# Altium footprint library John_W.PcbLib: 35 footprints (part 2 of 3)
Each footprint in its own frame and in the unit in brackets; x right, y up, seen from the top. Pads: shape width x height; smd on the part's side, far side on the other; paste and mask are expansions set on the pad; w line width, h text height; cw(c..) or ccw(c..) is an arc to the next point about the centre after c.
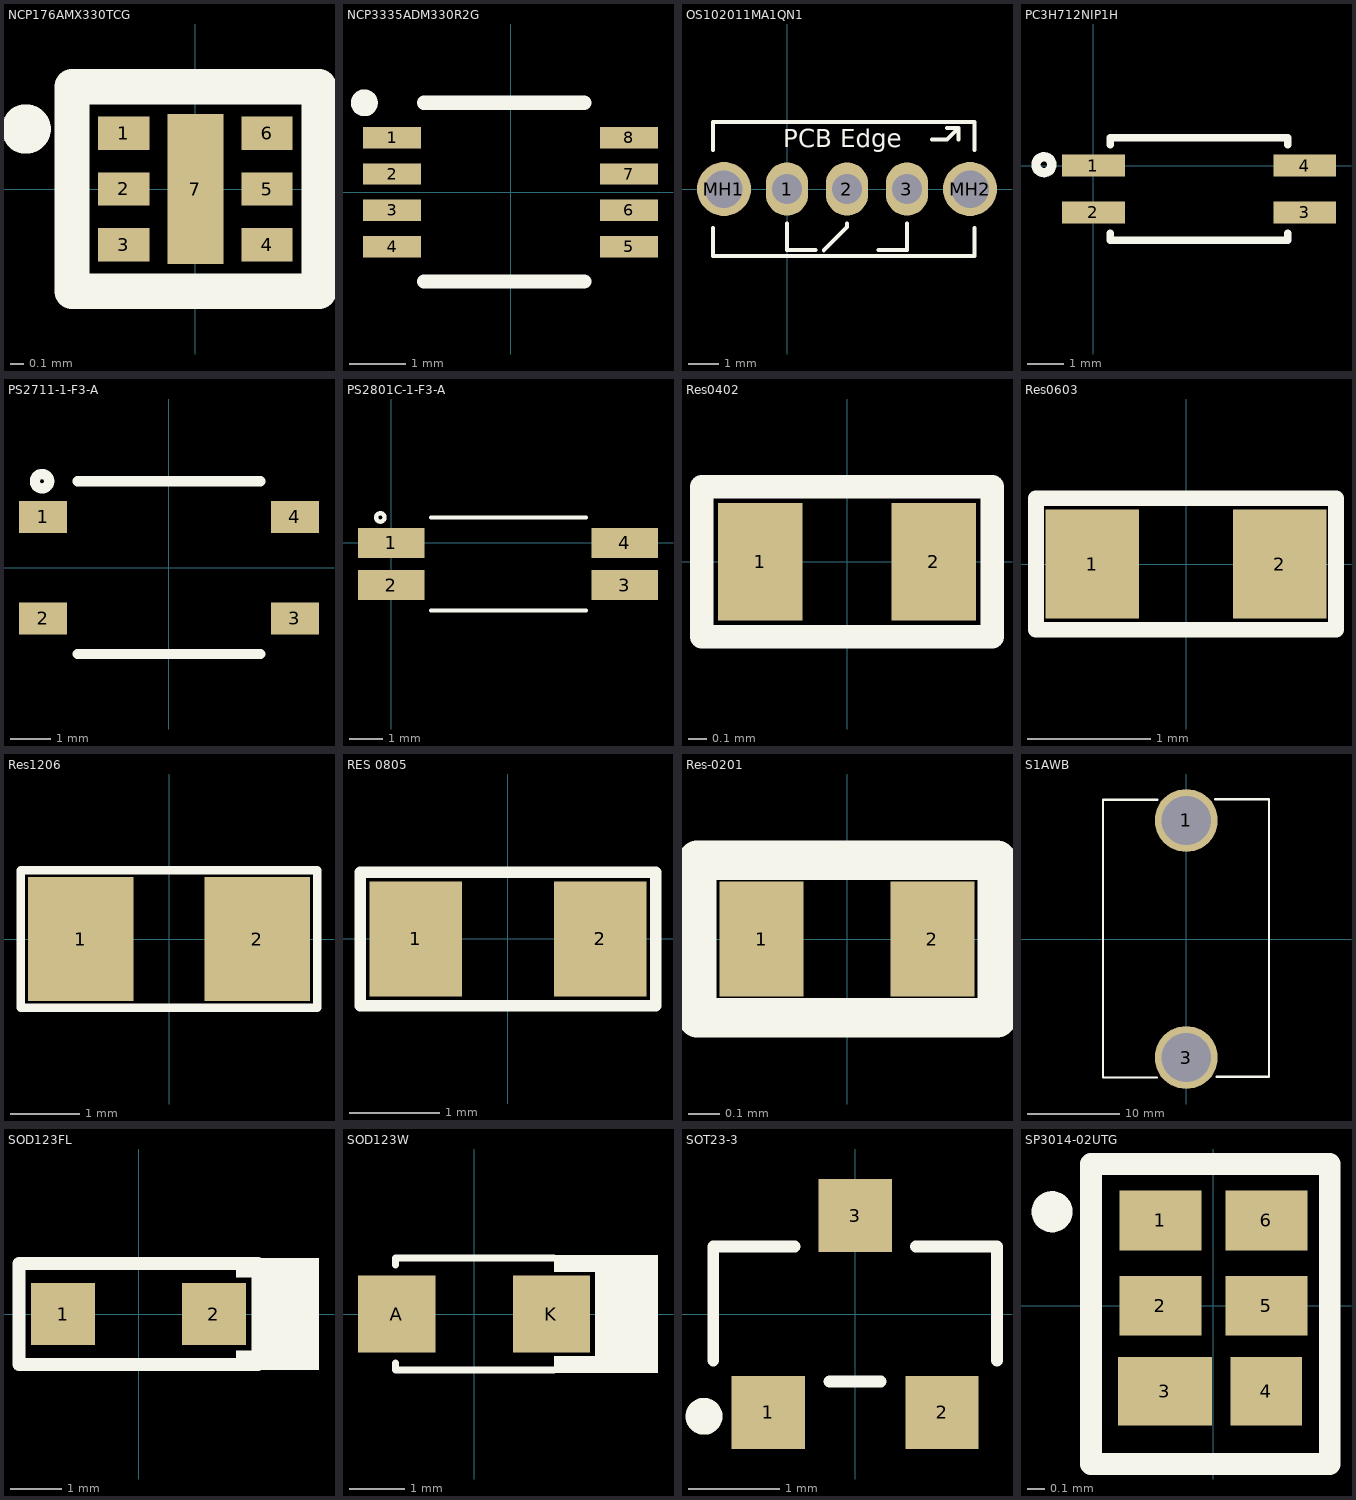
[diagram p1: the footprints below, top view; thin cyan lines are the x and y axes]

## NCP176AMX330TCG [mm]
pads (7):
  rect 0.37x0.24 smd: 1(-0.515,0.4) 2(-0.515,0) 3(-0.515,-0.4) 4(0.515,-0.4) 5(0.515,0) 6(0.515,0.4)
  rect 0.4x1.08 smd: 7(0,0)
Top Overlay:
  circle w0.254: c-1.219,0.432 r0.051
  lines w0.254: -0.889,-0.737 0.889,-0.737 0.889,0.737 -0.889,0.737 -0.889,-0.737

## NCP3335ADM330R2G [mm]
pads (8):
  rect 1.04x0.38 smd: 1(-2.12,0.975) 2(-2.12,0.325) 3(-2.12,-0.325) 4(-2.12,-0.975) 5(2.12,-0.975) 6(2.12,-0.325) 7(2.12,0.325) 8(2.12,0.975)
Top Overlay:
  circle w0.254: c-2.616,1.6 r0.114
  lines w0.254: -1.549,-1.6 1.321,-1.6 ; -1.549,1.6 1.321,1.6
3D body "User Library-MSOP-8 MSOP-8L.step": height 1.01, standoff 0, extent -2.46,-1.525 2.46,1.525

## OS102011MA1QN1 [mm] "2 Position SPDT Miniature Slide Switch 100MA 12V Through Hole, Right Angle"
pads (5):
  oval 1.4x1.778 hole 1: 1(0,0) 2(2,0) 3(4,0)
  round 1.8 hole 1.25: MH1(-2.1,0) MH2(6.1,0)
Top Overlay:
  lines w0.127: -2.464,-1.295 -2.464,-2.235 6.248,-2.235 6.248,-1.295 ; -2.464,1.295 -2.464,2.235 6.248,2.235 6.248,1.295 ; 0,-1.143 0,-2.032 0.952,-2.032 ; 1.222,-2.048 2,-1.27 2,-1.143 ; 3.048,-2.032 4,-2.032 4,-1.143 ; 4.826,1.651 5.334,1.651 5.715,2.032 ; 5.334,2.032 5.715,2.032 ; 5.715,1.651 5.715,2.032
  text "PCB Edge" at -0.127,1.397 h0.6
3D body "User Library-CK_Slide.step": height 4.71, standoff -2.78, extent -2.4,-2.286 6.21,6.086

## PC3H712NIP1H [mm] "OPTOISOLATOR TRANSISTOR SMD"
pads (4):
  rect 1.7x0.6 smd: 1(0,0) 2(0,-1.27) 3(5.74,-1.27) 4(5.74,0)
Top Overlay:
  circle w0.254: c-1.346,0.025 r0.216
  lines w0.2: 0.457,-1.829 0.457,-2.032 5.283,-2.032 5.283,-1.829 ; 0.457,0.559 0.457,0.762 5.283,0.762 5.283,0.559
3D body "User Library-ACPL-217-56DE.step": height 2.01, standoff -0.12, extent -0.604,-1.94 6.396,0.66

## PS2711-1-F3-A [mm]
pads (4):
  rect 1.2x0.8 smd: 1(-3.15,1.27) 2(-3.15,-1.27) 3(3.15,-1.27) 4(3.15,1.27)
Top Overlay:
  circle w0.254: c-3.175,2.159 r0.18
  lines w0.254: -2.286,-2.159 2.286,-2.159 ; -2.286,2.159 2.286,2.159
3D body "User Library-4-SOP.STEP": height 2.1, standoff 0, extent -3.4,-2.15 3.4,2.15

## PS2801C-1-F3-A [mm]
pads (4):
  rect 2x0.9 smd: 1(0,0) 2(0,-1.27) 3(7,-1.27) 4(7,0)
Top Overlay:
  circle w0.127: c-0.33,0.762 r0.127
  lines w0.127: 1.194,-2.032 5.842,-2.032 ; 1.194,0.762 5.842,0.762
3D body "User Library-SOP-4-1.step": height 2.1, standoff 0, extent 0.107,-2.022 7.107,0.777

## Res0402 [mil]
pads (2):
  rect 18x25 smd mask+4: 1(-18.5,0) 2(18.5,0)
Top Overlay:
  lines w0.13: -32,-17 32,-17
  lines w5: -31,-16 -31,16 31,16 31,-16 -31,-16
3D body "User Library-RES_1005-0402.step": height 16.14, standoff 0, extent -22.63,-10.82 22.64,10.83

## Res0603 [mil]
pads (2):
  rect 30x35 smd: 1(-30,0) 2(30,0)
Top Overlay:
  lines w5: -48,-21 48,-21 48,21 -48,21 -48,-21
3D body "User Library-RESC1608X05N.step": height 17.76, standoff 0, extent -30.52,-16.74 30.51,16.73

## Res1206 [mil]
pads (2):
  rect 60x70 smd: 1(-50,0) 2(50,0)
Top Overlay:
  lines w5: -84,-39 -84,39 84,39 84,-39 -84,-39
3D body "User Library-1206 SMD Resistor.step": height 39.45, standoff 0, extent -62.99,-31.49 63,31.51

## RES 0805 [mil] "SMD 0805"
pads (2):
  rect 40x50 smd: 1(-40,0) 2(40,0)
Top Overlay:
  lines w5: -64,-29 64,-29 64,29 -64,29 -64,-29
3D body "User Library-CR2012-0805.STEP": height 23.62, standoff 0, extent -39.34,-24.75 39.4,24.46

## Res-0201 [mm]
pads (2):
  rect 0.27x0.37 smd: 1(-0.275,0) 2(0.275,0)
Top Overlay:
  lines w0.127: -0.483,-0.254 -0.483,0.254 0.483,0.254 0.483,-0.254 -0.483,-0.254
3D body "User Library-0201(0603M) Res.step": height 0.29, standoff -0.02, extent -0.305,-0.152 0.305,0.153

## S1AWB [mm] "Toggle Switch SPST Panel Mount ON-NONE-OFF 20A @ 30VDC, Panel Mount, Solder Lug, IP68 Waterproof"
pads (2):
  round 6.8 hole 5.3: 1(0,12.803) 3(0,-12.803)
Top Overlay:
  lines w0.254: -3.175,-14.961 -8.992,-14.961 -8.992,15.037 -3.15,15.037 ; 3.124,15.113 8.941,15.113 8.941,-14.884 3.277,-14.884
3D body "S1AWB.stp": height 47.9, standoff -5.69, extent -9.017,-14.93 8.992,15.067

## SOD123FL [mm] "DIODE SCHOTTKY 20V 1A SOD123FL"
pads (2):
  rect 1.25x1.22 smd: 1(-1.475,0) 2(1.475,0)
Top Overlay:
  rectangle: 2.31,-1.092 3.531,1.092
  rectangle: 1.905,0.711 2.337,0.991
  rectangle: 1.905,-0.991 2.337,-0.711
  lines w0.254: 2.31,0.991 -2.339,0.991 -2.339,-0.991 2.335,-0.991 2.335,0.991
3D body "User Library-SOD123F.step": height 1.2, standoff -0.01, extent -1.826,-0.85 1.924,0.85

## SOD123W [mm] "DIODE SCHOTTKY 30V 1A SOD123W"
pads (2):
  rect 1.4x1.4 smd: A(-1.4,0) K(1.4,0)
Top Overlay:
  region: 3.327,1.067 2.184,1.067 2.184,-1.067 3.327,-1.067
  rectangle: 1.448,0.762 2.21,1.067
  rectangle: 1.448,-1.067 2.21,-0.762
  lines w0.127: -1.422,-0.889 -1.422,-1.016 1.448,-1.016 ; -1.422,0.889 -1.422,1.016 1.448,1.016
3D body "User Library-SOD123W.step": height 1.1, standoff -0.01, extent -2,-0.95 2,0.95

## SOT23-3 [mm] "SOT23, 3-Leads, Body 2.9x1.3mm, Pitch 0.95mm, Lead Span 2.3mm - Reverse Pinning, IPC High Density"
height 1.1
pads (3):
  rect 0.8x0.8 smd: 1(-0.95,-1.075) 2(0.95,-1.075) 3(0,1.075)
Top Overlay:
  circle w0.25: c-1.651,-1.118 r0.076
  lines w0.127: -1.55,-0.508 -1.55,0.737 -0.661,0.737 ; -0.28,-0.737 0.279,-0.737 ; 0.66,0.737 1.549,0.737 1.549,-0.508
3D body "CircuitWorks-SOT-23.step": height 1.05, standoff -0.05, extent -1.5,-1.25 1.5,1.25

## SP3014-02UTG [mm]
pads (6):
  rect 0.48x0.35 smd: 1(-0.31,0.5) 2(-0.31,0) 5(0.31,0) 6(0.31,0.5)
  rect 0.55x0.4 smd: 3(-0.285,-0.5)
  rect 0.42x0.4 smd: 4(0.31,-0.5)
Top Overlay:
  circle w0.127: c-0.945,0.551 r0.057
  lines w0.127: -0.716,-0.926 0.681,-0.926 0.681,0.83 -0.716,0.83 -0.716,-0.926
3D body "SP3401-02UTG.stp": height 0.65, standoff 0, extent -0.5,-0.85 0.5,0.75